# Altium schematic symbol library 调理电路板.SCHLIB: 432 symbols (part 8 of 8)
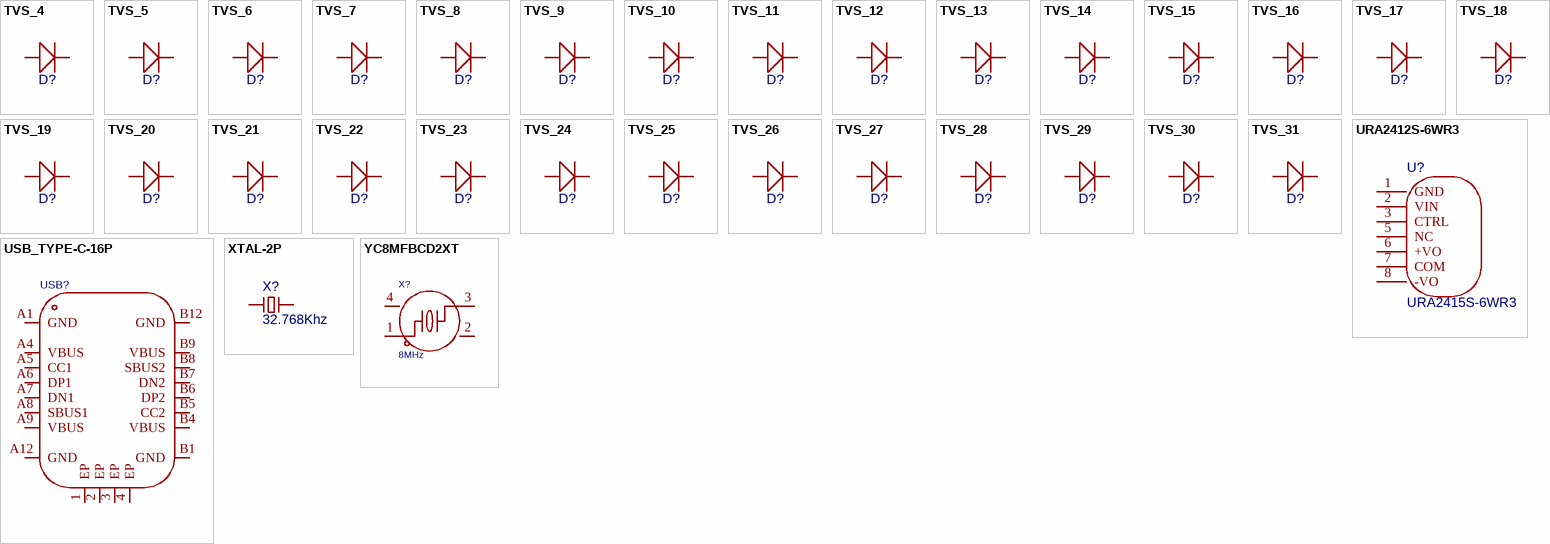
[diagram p17: symbols TVS_4 to YC8MFBCD2XT]

## TVS_29
designator D?, comment TVS  (value not drawn)
TVS保护; Type: E6.8CA; Origin Footprint: DIODE-AXL; OriginFootprint 3: DIODE-SMB; UniqueId: c472b11fbfc5fad6; AddInBom: yes; Device: TVS; Published: 8-Jun-2000; LatestRevisionDate: 17-Jul-2002; LatestRevisionNote: Re-released for DXP Platform.; PackageDocument: Sep-1996; PackageReference: SMC; Publisher: Altium Limited; Code_JEDEC: DO-214-AB; OriginFootprint 2: DIODE-1206; DesignItemID: TVS; LibraryName: 0.2 - 二极管-整流桥; SymbolName: TVS; FootprintName: DIODE-SMA
footprint DIODE-SMA
pins: 1 A, 2 K

## TVS_30
designator D?, comment TVS  (value not drawn)
TVS保护; Type: E6.8CA; Origin Footprint: DIODE-AXL; OriginFootprint 3: DIODE-SMB; UniqueId: f848fd831d889194; AddInBom: yes; Device: TVS; Published: 8-Jun-2000; LatestRevisionDate: 17-Jul-2002; LatestRevisionNote: Re-released for DXP Platform.; PackageDocument: Sep-1996; PackageReference: SMC; Publisher: Altium Limited; Code_JEDEC: DO-214-AB; OriginFootprint 2: DIODE-1206; DesignItemID: TVS; LibraryName: 0.2 - 二极管-整流桥; SymbolName: TVS; FootprintName: DIODE-SMA
footprint DIODE-SMA
pins: 1 A, 2 K

## TVS_31
designator D?, comment TVS  (value not drawn)
TVS保护; Type: E6.8CA; Origin Footprint: DIODE-AXL; OriginFootprint 3: DIODE-SMB; UniqueId: 4252564f599b9a97; AddInBom: yes; Device: TVS; Published: 8-Jun-2000; LatestRevisionDate: 17-Jul-2002; LatestRevisionNote: Re-released for DXP Platform.; PackageDocument: Sep-1996; PackageReference: SMC; Publisher: Altium Limited; Code_JEDEC: DO-214-AB; OriginFootprint 2: DIODE-1206; DesignItemID: TVS; LibraryName: 0.2 - 二极管-整流桥; SymbolName: TVS; FootprintName: DIODE-SMA
footprint DIODE-SMA
pins: 1 A, 2 K

## URA2412S-6WR3
designator U?, comment URA2415S-6WR3
URA2415-6WR3; Device: URA2412S-6WR3; UniqueId: a58fb99779b31798; AddInBom: yes; DesignItemID: URA2412S-6WR3; LibraryName: 1.1 - 电源类芯片; SymbolName: URA2412S-6WR3; FootprintName: SIP-8
footprint SIP-8
pins: 1 GND, 2 VIN, 3 CTRL, 5 NC, 6 +VO, 7 COM, 8 -VO

## USB_TYPE-C-16P
designator USB?
Symbol: USB_TYPE-C-16P; AddInBom: yes; ModelId: 35058e297fd54ee2afd2de30c3ce7155聨0819f05c4eef4c71ace90d822a990e87; ModelName: USB-C_SMD-TYPE-C-31-M-12; ModelTransform: 360,318.121,0,180,0,0,0,-41.02,-39.37; Device: USB_TYPE-C-16P; Supplier Footprint: SMD; ConvertToPcb: yes; FootprintName: USB_TYPE-C-16P
footprint USB_TYPE-C-16P
pins: 1 EP, 2 EP, 3 EP, 4 EP, A1 GND, A4 VBUS, A5 CC1, A6 DP1, A7 DN1, A8 SBUS1, A9 VBUS, A12 GND, B1 GND, B4 VBUS, B5 CC2, B6 DP2, B7 DN2, B8 SBUS2, B9 VBUS, B12 GND

## XTAL-2P
designator X?, comment 32.768Khz
2脚无源脚晶振; Device: XTAL-2P; 版权归属: 封装库来自淘宝卖家 ID：黄晶宝石; Origin Footprint: OSC HC-49S; OriginFootprint 2: OSC 455E-LI; OriginFootprint 3: OSC 455E-WI; OriginFootprint 4: OSC 3215-2P; OriginFootprint 5: OSC 5032-2P; OriginFootprint 6: OSC 6035-2P; OriginFootprint 7: OSC 7050-2P; OriginFootprint 8: OSC 8045-2P; OriginFootprint 9: OSC-2x6-LI; OriginFootprint 10: OSC-2x6-WI-A; OriginFootprint 11: OSC-2x6-WI-B; OriginFootprint 12: OSC-2x6-WS; OriginFootprint 13: OSC-3x8-LI; OriginFootprint 14: OSC-3x8-WI-A; OriginFootprint 15: OSC-3x8-WI-B; OriginFootprint 16: OSC-3x8-WS; OriginFootprint 17: OSC-3x10-LI; OriginFootprint 18: OSC-3x10-WI-A; OriginFootprint 19: OSC-3x10-WI-B; OriginFootprint 20: OSC-3x10-WS; OriginFootprint 21: OSC HC-49SMD; OriginFootprint 22: OSC HC-49U; OriginFootprint 23: OSC UM-1; OriginFootprint 24: OSC UM-5; AddInBom: yes; BOM名称: 2脚无源脚晶振; 学习资源: https://shop463601444.taobao.com; DesignItemID: XTAL-2P; LibraryName: 2.0 - 保险丝-晶振-光耦; Symbol: XTAL-2P; FootprintName: 32.768K
footprint 32.768K
pins: 1, 2

## YC8MFBCD2XT
designator X?, comment 8MHz
晶振类型:贴片晶振;频率:8MHz;常温频差:±10ppm;负载电容:12pF;频率稳定度:±20ppm;; Manufacturer: YJX(雅晶鑫); Symbol: YC8MFBCD2XT; AddInBom: yes; ModelId: ff2dfd5650294453a14147960efe1838聨0819f05c4eef4c71ace90d822a990e87; ModelName: CRYSTAL-SMD_4P-L3.2-W2.5-BL; ModelTransform: 125.984,98.425,0,0,0,0,0,0,0; Normal temperature Frequency Tolerance: ±10ppm; Load Capacitance: 12pF; Frequency Stability: ±20ppm; Device: YC8MFBCD2XT; LCSC Part Name: 3225 8M 12PF ±10PPM; SupplierPart: C52164298; ManufacturerPart: YC8MFBCD2XT; Supplier Footprint: SMD3225-4P; JLCPCB Part Class: Extended Part; Datasheet: https://item.szlcsc.com/datasheet/YC8MFBCD2XT/54978925.html; Supplier: LCSC; ConvertToPcb: yes; FootprintName: CRYSTAL-SMD_4P-L3.2-W2.5-BL; Type: 贴片晶振; Value: 8MHz; Operating Temperature: -40℃~+85℃
footprint CRYSTAL-SMD_4P-L3.2-W2.5-BL
pins: 1, 2 GND, 3, 4 GND